# Altium footprint library AMC3302DWER.PcbLib: 4 footprints
Each footprint in its own frame and in the unit in brackets; x right, y up, seen from the top. Pads: shape width x height; smd on the part's side, far side on the other; paste and mask are expansions set on the pad; w line width, h text height; cw(c..) or ccw(c..) is an arc to the next point about the centre after c.
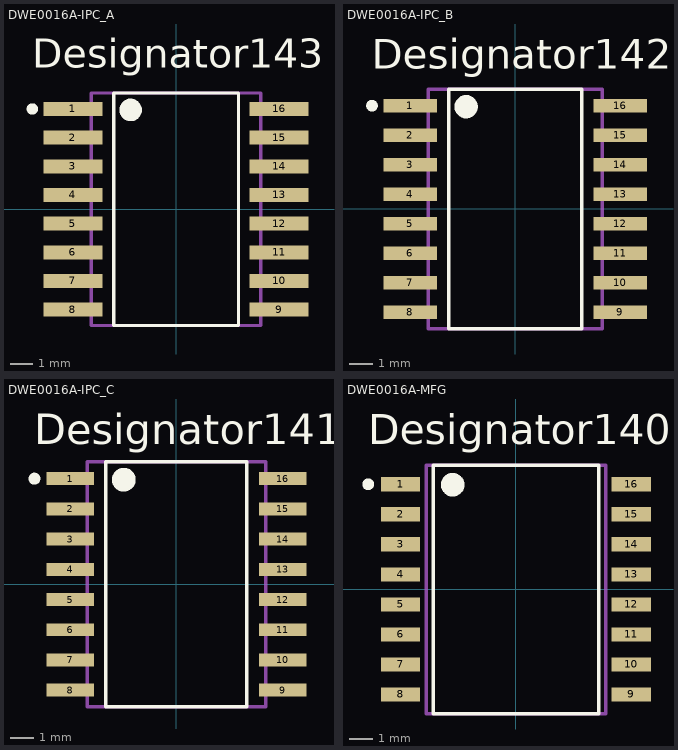
[diagram p0: the footprints below, top view; thin cyan lines are the x and y axes]

## DWE0016A-IPC_A [mm]
pads (16):
  rect 2.603x0.622 smd paste+0 mask+0: 1(-4.565,4.445) 2(-4.565,3.175) 3(-4.565,1.905) 4(-4.565,0.635) 5(-4.565,-0.635) 6(-4.565,-1.905) 7(-4.565,-3.175) 8(-4.565,-4.445) 9(4.565,-4.445) 10(4.565,-3.175) 11(4.565,-1.905) 12(4.565,-0.635) 13(4.565,0.635) 14(4.565,1.905) 15(4.565,3.175) 16(4.565,4.445)
Top Overlay:
  circle w0.5: c-2.014,4.4 r0.25
  circle w0.25: c-6.367,4.445 r0.125
  lines w0.15: -2.764,-5.15 2.764,-5.15 2.764,5.15 -2.764,5.15 -2.764,-5.15
  text ".Designator" at -3.492,-0.635 h1.27
  text "Designator143" at -6.375,6.274 h1.27
Mechanical 13:
  lines w0.15: -3.75,-5.15 3.75,-5.15 3.75,5.15 -3.75,5.15 -3.75,-5.15
  text ".Designator" at -3.492,-0.635 h1.27
3D body "DWE0016A.stp": height 2.59, standoff 0, extent -5.04,-5.15 5.294,5.15

## DWE0016A-IPC_B [mm]
pads (16):
  rect 2.303x0.582 smd paste+0 mask+0: 1(-4.515,4.445) 2(-4.515,3.175) 3(-4.515,1.905) 4(-4.515,0.635) 5(-4.515,-0.635) 6(-4.515,-1.905) 7(-4.515,-3.175) 8(-4.515,-4.445) 9(4.515,-4.445) 10(4.515,-3.175) 11(4.515,-1.905) 12(4.515,-0.635) 13(4.515,0.635) 14(4.515,1.905) 15(4.515,3.175) 16(4.515,4.445)
Top Overlay:
  circle w0.5: c-2.114,4.4 r0.25
  circle w0.25: c-6.167,4.445 r0.125
  lines w0.15: -2.864,-5.15 2.864,-5.15 2.864,5.15 -2.864,5.15 -2.864,-5.15
  text ".Designator" at -3.492,-0.635 h1.27
  text "Designator142" at -6.168,6.045 h1.27
Mechanical 13:
  lines w0.15: -3.75,-5.15 3.75,-5.15 3.75,5.15 -3.75,5.15 -3.75,-5.15
  text ".Designator" at -3.492,-0.635 h1.27
3D body "DWE0016A.stp": height 2.59, standoff 0, extent -5.04,-5.15 5.294,5.15

## DWE0016A-IPC_C [mm]
pads (16):
  rect 2.003x0.542 smd paste+0 mask+0: 1(-4.465,4.445) 2(-4.465,3.175) 3(-4.465,1.905) 4(-4.465,0.635) 5(-4.465,-0.635) 6(-4.465,-1.905) 7(-4.465,-3.175) 8(-4.465,-4.445) 9(4.465,-4.445) 10(4.465,-3.175) 11(4.465,-1.905) 12(4.465,-0.635) 13(4.465,0.635) 14(4.465,1.905) 15(4.465,3.175) 16(4.465,4.445)
Top Overlay:
  circle w0.5: c-2.214,4.4 r0.25
  circle w0.25: c-5.967,4.445 r0.125
  lines w0.15: -2.964,-5.15 2.964,-5.15 2.964,5.15 -2.964,5.15 -2.964,-5.15
  text ".Designator" at -3.492,-0.635 h1.27
  text "Designator141" at -5.969,5.893 h1.27
Mechanical 13:
  lines w0.15: -3.75,-5.15 3.75,-5.15 3.75,5.15 -3.75,5.15 -3.75,-5.15
  text ".Designator" at -3.492,-0.635 h1.27
3D body "DWE0016A.stp": height 2.59, standoff 0, extent -5.167,-5.15 5.167,5.15

## DWE0016A-MFG [mm]
pads (16):
  rect 1.65x0.6 smd paste+0 mask+0: 1(-4.875,4.445) 2(-4.875,3.175) 3(-4.875,1.905) 4(-4.875,0.635) 5(-4.875,-0.635) 6(-4.875,-1.905) 7(-4.875,-3.175) 8(-4.875,-4.445) 9(4.875,-4.445) 10(4.875,-3.175) 11(4.875,-1.905) 12(4.875,-0.635) 13(4.875,0.635) 14(4.875,1.905) 15(4.875,3.175) 16(4.875,4.445)
Top Overlay:
  circle w0.25: c-6.25,4.445 r0.125
  circle w0.5: c-2.675,4.425 r0.25
  lines w0.15: -3.5,-5.25 3.5,-5.25 3.5,5.25 -3.5,5.25 -3.5,-5.25
  text ".Designator" at -3.492,-0.635 h1.27
  text "Designator140" at -6.248,6.147 h1.27
Mechanical 13:
  lines w0.15: -3.8,-5.25 3.8,-5.25 3.8,5.25 -3.8,5.25 -3.8,-5.25
  text ".Designator" at -3.492,-0.635 h1.27
3D body "DWE0016A.stp": height 2.59, standoff 0, extent -5.167,-5.15 5.167,5.15